# Altium footprint library male_header_2pin.PcbLib: 1 footprints
Each footprint in its own frame and in the unit in brackets; x right, y up, seen from the top. Pads: shape width x height; smd on the part's side, far side on the other; paste and mask are expansions set on the pad; w line width, h text height; cw(c..) or ccw(c..) is an arc to the next point about the centre after c.
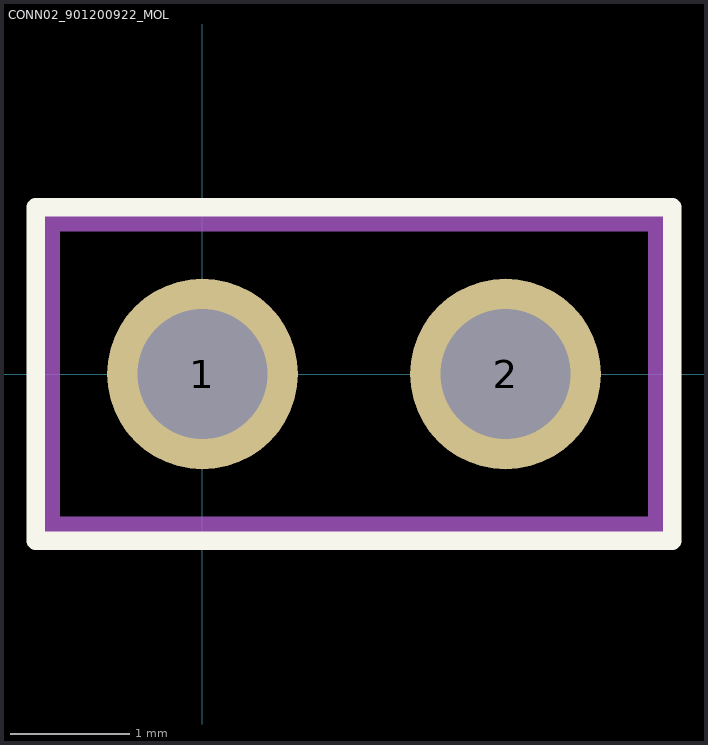
[diagram p0: the footprint, top view; thin cyan lines are the x and y axes]

## CONN02_901200922_MOL [mil]
pads (2):
  round 63 hole 43: 1(0,0) 2(100,0)
Top Overlay:
  lines w6: -55,-55 -55,55 155,55 155,-55 -55,-55
Assembly Top:
  lines w6: -50,-50 -50,50 150,50 150,-50 -50,-50